# Altium footprint library LimeMicroAltiumLib.PcbLib: 876 footprints (part 13 of 57)
Each footprint in its own frame and in the unit in brackets; x right, y up, seen from the top. Pads: shape width x height; smd on the part's side, far side on the other; paste and mask are expansions set on the pad; w line width, h text height; cw(c..) or ccw(c..) is an arc to the next point about the centre after c.
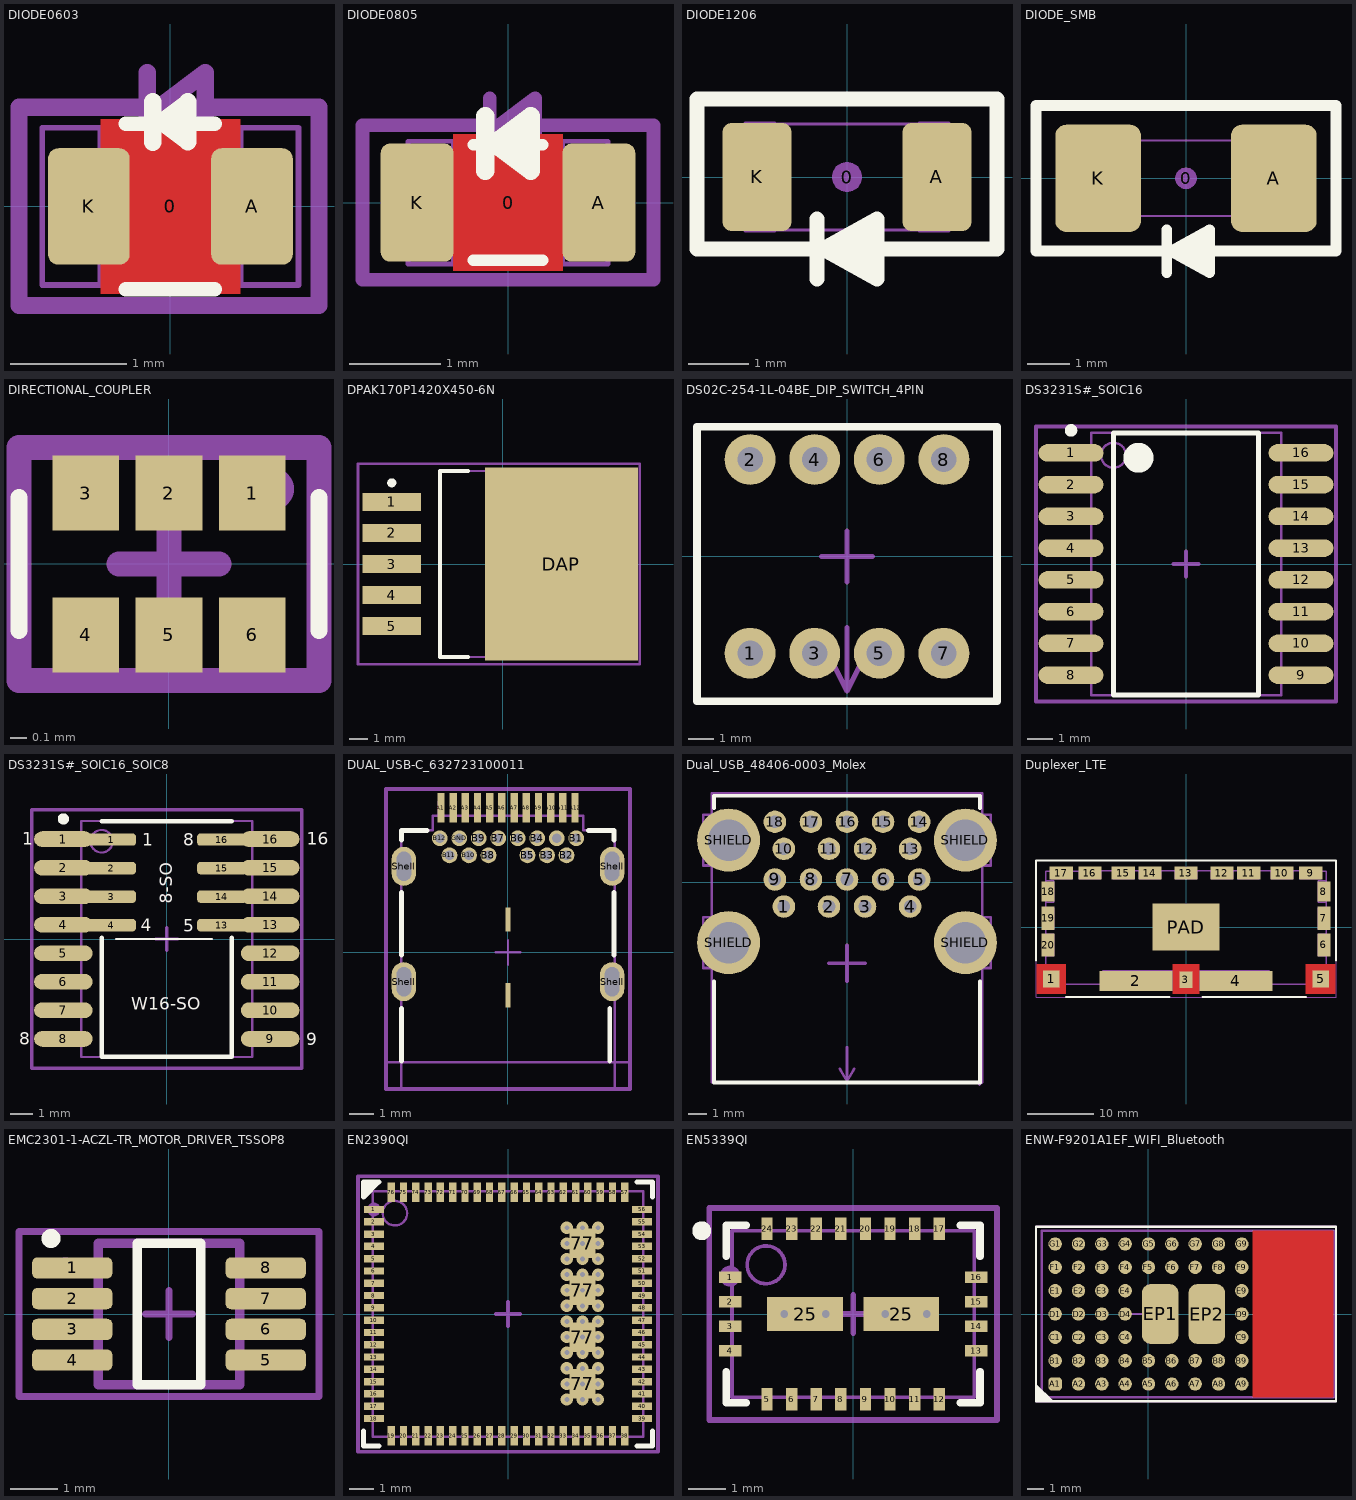
[diagram p12: the footprints below, top view; thin cyan lines are the x and y axes]

## DIODE0603 [mm]
height 0.7
pads (3):
  round 0.254 on Mech15: 0(0,0)
  rrect25% 0.7x1 smd: A(0.7,0) K(-0.7,0)
Top Layer:
  pour cut-out: -0.6,0.75 0.6,0.75 0.6,-0.75 -0.6,-0.75
Top Overlay:
  lines w0.127: -0.381,-0.71 0.381,-0.71 ; -0.381,0.71 0.381,0.71
  lines w0.15: -0.15,0.55 -0.15,0.9 ; 0.15,0.894 -0.075,0.725 0.15,0.556 0.15,0.897
Mechanical 13:
  lines w0.05: 0.6,-0.674 -0.6,-0.674 ; -0.6,-0.674 0.6,-0.674 ; -0.6,-0.675 -1.1,-0.675 -1.1,0.675 -0.6,0.675 -0.6,-0.675 ; 0.6,-0.675 1.1,-0.675 1.1,0.675 0.6,0.675 ; 0.6,-0.675 0.6,0.675 ; 0.6,0.674 -0.6,0.674 0.6,0.674
Mechanical 15:
  lines w0.15: -0.2,0.55 -0.2,1.15 ; -0.1,0.85 0.3,0.55 0.3,1.15 ; -0.1,0.85 0.3,1.15 ; -0.1,0.85 0.3,0.85 0.3,1.15 ; -1.3,-0.85 -1.3,0.85 1.275,0.85 1.275,-0.85 -1.3,-0.85
  text "C" at -1.05,-0.4 h0.55
  text "A" at 0.5,-0.375 h0.55
  text ".Designator" at 0,0 h0.55
3D body "RES 0805 (2012 metric).STEP": height 0.69, standoff -0.01, extent -1.1,-0.675 1.1,0.675

## DIODE0805 [mm] "Chip Resistor, Body 2.0x1.2mm, 0805, IPC Medium Density"
height 0.7
pads (3):
  round 0.254 on Mech15: 0(0,0)
  rrect25% 0.8x1.3 smd: A(1,0) K(-1,0)
Top Layer:
  pour cut-out: -0.6,0.75 0.6,0.75 0.6,-0.75 -0.6,-0.75
Top Overlay:
  lines w0.127: -0.381,-0.635 0.381,-0.635 ; -0.381,0.635 0.381,0.635
  lines w0.2: -0.25,0.35 -0.25,0.95 ; -0.15,0.65 0.25,0.35 0.25,0.95 ; -0.15,0.65 0.25,0.95 ; -0.15,0.65 0.25,0.65 0.25,0.95
Mechanical 13:
  lines w0.05: 0.6,-0.674 -0.6,-0.674 ; -0.6,-0.675 -0.6,0.675 -1.1,0.675 -1.1,-0.675 -0.6,-0.675 ; -0.6,-0.674 0.6,-0.674 ; 0.6,-0.675 0.6,0.675 ; 0.6,-0.675 1.1,-0.675 1.1,0.675 0.6,0.675 ; 0.6,0.674 -0.6,0.674 0.6,0.674
Mechanical 15:
  lines w0.15: -0.2,0.55 -0.2,1.15 ; -0.1,0.85 0.3,0.85 0.3,1.15 ; -0.1,0.85 0.3,1.15 ; -0.1,0.85 0.3,0.55 0.3,1.15 ; -1.6,-0.85 1.6,-0.85 1.6,0.85 -1.6,0.85 -1.6,-0.85
  text ".Designator" at 0,0 h0.55
  text "A" at 0.7,-0.3 h0.55
  text "C" at -1.275,-0.3 h0.55
3D body "RES 0805 (2012 metric).STEP": height 0.69, standoff -0.01, extent -1.1,-0.675 1.1,0.675

## DIODE1206 [mm]
height 1.6
pads (3):
  round 0.508 on Mech15: 0(0,0)
  rrect25% 1.15x1.8 smd: A(1.5,0) K(-1.5,0)
Top Overlay:
  lines w0.254: -0.5,-1.7 -0.5,-0.7 ; 0,-1.4 0.5,-1.4 ; 0.1,-1 0.5,-1 ; 0.5,-1.2 0.3,-1.2 -0.4,-1.2 ; -0.4,-1.2 0.5,-0.7 0.5,-1.7 -0.4,-1.2 ; -2.5,-1.2 2.5,-1.2 2.5,1.3 -2.5,1.3 -2.5,-1.2
Mechanical 13:
  lines w0.05: -1.2,-0.88 1.2,-0.88 ; -1.2,0.88 1.2,0.88 ; -1.7,-0.9 -1.2,-0.9 -1.2,0.9 -1.7,0.9 -1.7,-0.9 ; 1.2,-0.9 1.7,-0.9 1.7,0.9 1.2,0.9 1.2,-0.9
Mechanical 15:
  lines w0.15: -0.5,-1.7 -0.5,-0.7 ; 0,-1.4 0.5,-1.4 ; 0.1,-1 0.5,-1 ; 0.5,-1.2 0.3,-1.2 -0.4,-1.2 ; -0.4,-1.2 0.5,-1.7 0.5,-0.7 -0.4,-1.2 ; -2.5,-1.2 -2.5,1.3 2.5,1.3 2.5,-1.2 -2.5,-1.2
  text ".Designator" at 0,0 h0.55
3D body "CAP_1206.STEP": height 1.74, standoff -0.01, extent -1.7,-0.9 1.7,0.9

## DIODE_SMB [mm]
height 1.6
pads (3):
  round 0.508 on Mech15: 0(0,0)
  rrect25% 2x2.5 smd: A(2.05,0) K(-2.05,0)
Top Overlay:
  lines w0.254: -0.45,-2.2 -0.45,-1.2 ; 0.05,-1.9 0.55,-1.9 ; 0.15,-1.5 0.55,-1.5 ; 0.55,-1.7 0.35,-1.7 -0.35,-1.7 ; -0.35,-1.7 0.55,-1.2 0.55,-2.2 -0.35,-1.7 ; -3.5,-1.7 3.5,-1.7 3.5,1.7 -3.5,1.7 -3.5,-1.7
Mechanical 13:
  lines w0.05: -1.2,-0.88 1.2,-0.88 ; -1.2,0.88 1.2,0.88 ; -1.7,-0.9 -1.2,-0.9 -1.2,0.9 -1.7,0.9 -1.7,-0.9 ; 1.2,-0.9 1.7,-0.9 1.7,0.9 1.2,0.9 1.2,-0.9
Mechanical 15:
  lines w0.15: -0.45,-2.2 -0.45,-1.2 ; 0.05,-1.9 0.55,-1.9 ; 0.15,-1.5 0.55,-1.5 ; 0.55,-1.7 0.35,-1.7 -0.35,-1.7 ; -0.35,-1.7 0.55,-2.2 0.55,-1.2 -0.35,-1.7 ; -3.5,-1.7 -3.5,1.7 3.5,1.7 3.5,-1.7 -3.5,-1.7
  text ".Designator" at 0,0 h0.55
  text "C" at -2.2,-0.5 h0.55
  text "A" at 1.7,-0.5 h0.55
3D body "DO-214AA.STEP": height 2.62, standoff 0, extent -2.7,-2 2.9,1.95

## DIRECTIONAL_COUPLER [mm]
height 0.7
pads (6):
  rect 0.4x0.45 smd mask+0.05: 1(0.5,0.425) 2(0,0.425) 3(-0.5,0.425) 4(-0.5,-0.425) 5(0,-0.425) 6(0.5,-0.425)
Top Overlay:
  lines w0.1: -0.9,-0.4 -0.9,0.4 ; 0.9,-0.4 0.9,0.4
Top Solder:
  region: -0.75,-0.15 0.75,-0.15 0.75,-0.7 -0.75,-0.7
  region: -0.75,0.7 0.75,0.7 0.75,0.15 -0.75,0.15
Mechanical 15:
  circle w0.2: c0.625,0.45 r0.025
  lines w0.15: -0.3,0 0.3,0 ; 0,-0.3 0,0.3 ; -0.9,-0.7 -0.9,0.7 0.9,0.7 0.9,-0.7 -0.9,-0.7
  text ".Designator" at 0,0 h0.55
3D body: height 0.6, standoff 0, extent -0.65,0.275 -0.35,0.425
3D body: height 0.6, standoff 0, extent -0.15,0.275 0.15,0.425
3D body: height 0.6, standoff 0, extent 0.35,0.275 0.65,0.425
3D body: height 0.6, standoff 0, extent 0.35,-0.425 0.65,-0.275
3D body: height 0.6, standoff 0, extent -0.15,-0.425 0.15,-0.275
3D body: height 0.6, standoff 0, extent -0.65,-0.425 -0.35,-0.275
3D body: height 0.6, standoff 0, extent 0.463,-0.075 0.663,0.15
3D body: height 0.6, standoff 0, extent -0.8,-0.4 0.8,0.4

## DPAK170P1420X450-6N [mm] "D2-PAK, 6-Pads, Body 7,75x8,46mm (max), IPC Medium Density"
height 4.5
pads (6):
  rect 3.2x1 smd: 1(-6.1,3.4) 2(-6.1,1.7) 3(-6.1,0) 4(-6.1,-1.7) 5(-6.1,-3.4)
  rect 8.38x10.6 smd: DAP(3.2,0)
Top Overlay:
  circle w0.25: c-6.1,4.45 r0.125
  lines w0.2: -1.9,-5.1 -3.45,-5.1 -3.45,5.1 -1.9,5.1
Mechanical 13:
  lines w0.1: -3.45,-5.1 5.85,-5.1 5.85,5.1 -3.45,5.1 -3.45,-5.1
Mechanical 15:
  circle w0.35: c-6.225,3.425 r0.103
  lines w0.15: -0.5,0 0.5,0 ; 0,-0.5 0,0.5 ; -7.95,-5.5 7.5,-5.5 7.5,5.5 -7.95,5.5 -7.95,-5.5
  text ".Designator" at 0,0 h0.55
3D body: height 4.5, standoff 0, extent -3.45,-5.1 5.85,5.1

## DS02C-254-1L-04BE_DIP_SWITCH_4PIN [mm]
pads (8):
  round 2 hole 1 mask+0.05: 1(-3.81,-3.81) 2(-3.81,3.81) 3(-1.27,-3.81) 4(-1.27,3.81) 5(1.27,-3.81) 6(1.27,3.81) 7(3.81,-3.81) 8(3.81,3.81)
Top Overlay:
  lines w0.3: -5.9,-5.7 -5.9,5.1 5.9,5.1 5.9,-5.7 -5.9,-5.7
Mechanical 15:
  lines w0.2: -1,0 0,0 ; -0.5,-4.3 0,-5.3 ; 0,-2.8 0,-5.3 ; 0,-1 0,0 ; 0,1 0,0 ; 0.5,-4.3 0,-5.3 ; 1,0 0,0 ; -5.9,-5.7 -5.9,5.1 5.9,5.1 5.9,-5.7 -5.9,-5.7
  text "2" at -3.9,3.6 h0.55
  text "1" at -3.9,-4 h0.55
  text "Board edge" at -2.3,-2.4 h0.55
  text ".Designator" at 0,0 h0.55
3D body "CUI_DEVICES_DS02C-254-1L-04BE.step": height 9.46, standoff -3.8, extent -5.865,-7.8 5.865,5.08

## DS3231S#_SOIC16 [mm] "SOIC, 16-Leads, Body 10.3x7.5mm, Pitch 1.27mm, IPC Low Density"
height 2.65
pads (16):
  oval 2.6x0.7 smd: 1(-4.6,4.445) 2(-4.6,3.175) 3(-4.6,1.905) 4(-4.6,0.635) 5(-4.6,-0.635) 6(-4.6,-1.905) 7(-4.6,-3.175) 8(-4.6,-4.445) 9(4.6,-4.445) 10(4.6,-3.175) 11(4.6,-1.905) 12(4.6,-0.635) 13(4.6,0.635) 14(4.6,1.905) 15(4.6,3.175) 16(4.6,4.445)
Top Overlay:
  circle w0.6: c-1.9,4.25 r0.3
  circle w0.25: c-4.6,5.345 r0.125
  lines w0.2: -2.9,-5.25 2.9,-5.25 2.9,5.25 -2.9,5.25 -2.9,-5.25
Mechanical 13:
  circle w0.1: c-2.9,4.35 r0.5
  lines w0.1: -3.8,-5.25 3.8,-5.25 3.8,5.25 -3.8,5.25 -3.8,-5.25
Mechanical 15:
  circle w0.25: c-4.6,4.4 r0.1
  lines w0.15: -0.5,0 0.5,0 ; 0,-0.5 0,0.5 ; -6,-5.5 6,-5.5 6,5.5 -6,5.5 -6,-5.5
  text ".Designator" at 0,0 h0.55
3D body "User Library-SOIC16-300.step": height 2.65, standoff 0, extent -5.15,-5.15 5.15,5.15

## DS3231S#_SOIC16_SOIC8 [mm] "SOIC, 16-Leads, Body 10.3x7.5mm, Pitch 1.27mm, IPC Low Density"
height 2.65
pads (24):
  oval 2.6x0.7 smd: 1(-4.6,4.445) 2(-4.6,3.175) 3(-4.6,1.905) 4(-4.6,0.635) 5(-4.6,-0.635) 6(-4.6,-1.905) 7(-4.6,-3.175) 8(-4.6,-4.445) 9(4.6,-4.445) 10(4.6,-3.175) 11(4.6,-1.905) 12(4.6,-0.635) 13(4.6,0.635) 14(4.6,1.905) 15(4.6,3.175) 16(4.6,4.445)
  rrect50% 2.2x0.55 smd mask+0.05: 1(-2.475,4.425) 2(-2.475,3.155) 3(-2.475,1.885) 4(-2.475,0.615) 13(2.455,0.615) 14(2.455,1.885) 15(2.455,3.155) 16(2.455,4.425)
Top Overlay:
  circle w0.25: c-4.6,5.345 r0.125
  lines w0.1: -2.25,0 2,0
  lines w0.2: -2.9,0.05 -2.9,-5.25 2.9,-5.25 2.9,0.05 ; -2.9,5.25 2.9,5.25
  text "8-SO" at 0.25,1.575 h0.55
  text "W16-SO" at -1.575,-3.15 h0.55
  text "1" at -6.425,4.2 h0.55
  text "1" at -1.1,4.15 h0.55
  text "8" at -6.575,-4.7 h0.55
  text "9" at 6.2,-4.725 h0.55
  text "16" at 6.225,4.2 h0.55
  text "8" at 0.725,4.15 h0.55
  text "4" at -1.15,0.35 h0.55
  text "5" at 0.725,0.325 h0.55
Mechanical 13:
  circle w0.1: c-2.9,4.35 r0.5
  lines w0.1: -3.8,-5.25 3.8,-5.25 3.8,5.25 -3.8,5.25 -3.8,-5.25
Mechanical 15:
  circle w0.25: c-4.6,4.4 r0.1
  lines w0.15: -0.5,0 0.5,0 ; 0,-0.5 0,0.5 ; -6,-5.75 6,-5.75 6,5.75 -6,5.75 -6,-5.75
  text ".Designator" at 0,0 h0.55
3D body "User Library-SOIC16-300.step": height 2.65, standoff 0, extent -5.15,-5.15 5.15,5.15

## DUAL_USB-C_632723100011 [mm]
pads (32):
  rect 0.3x1.2 smd mask+0.05: A1(-2.75,5.93) A2(-2.25,5.93) A3(-1.75,5.93) A4(-1.25,5.93) A5(-0.75,5.93) A6(-0.25,5.93) A7(0.25,5.93) A8(0.75,5.93) A9(1.25,5.93) A10(1.75,5.93) A11(2.25,5.93) A12(2.75,5.93)
  round 0.65 hole 0.4 mask+0.05: B1(2.8,4.68) B2(2.4,3.98) B3(1.6,3.98) B4(1.2,4.68) B5(0.8,3.98) B6(0.4,4.68) B7(-0.4,4.68) B8(-0.8,3.98) B9(-1.2,4.68) B10(-1.6,3.98) B11(-2.4,3.98) B12(-2.8,4.68) GND(-2,4.68) GND1(2,4.68)
  oval 1x1.6 hole 0.6 slot 1.2 at 90 deg mask+0.05: Shell(-4.27,-1.2) Shell(-4.27,3.53) Shell(4.27,-1.2) Shell(4.27,3.53)
  rect 0.2x1 smd mask+0.05: Shell(0,-1.75) Shell(0,1.35)
Top Overlay:
  lines w0.2: -4.37,-4.45 -4.37,-2.3 ; -4.37,-0.1 -4.37,2.45 ; -4.37,4.6 -4.37,5 -3.32,5 ; 3.29,5 4.34,5 4.34,4.6 ; 4.17,-4.45 4.17,-2.3 ; 4.34,-0.1 4.34,2.45
Mechanical 13:
  lines w0.05: -2.85,5.6 -2.85,6.19 -2.65,6.19 -2.65,5.6 ; -2.35,5.6 -2.35,6.19 -2.15,6.19 -2.15,5.6 ; -1.85,5.6 -1.85,6.19 -1.65,6.19 -1.65,5.6 ; -1.35,5.6 -1.35,6.19 -1.15,6.19 -1.15,5.6 ; -0.85,5.6 -0.85,6.19 -0.65,6.19 -0.65,5.6 ; -0.35,5.6 -0.35,6.19 -0.15,6.19 -0.15,5.6 ; 0.15,5.6 0.15,6.19 0.35,6.19 0.35,5.6 ; 0.65,5.6 0.65,6.19 0.85,6.19 0.85,5.6 ; 1.15,5.6 1.15,6.19 1.35,6.19 1.35,5.6 ; 1.65,5.6 1.65,6.19 1.85,6.19 1.85,5.6 ; 2.15,5.6 2.15,6.19 2.35,6.19 2.35,5.6 ; 2.65,5.6 2.65,6.19 2.85,6.19 2.85,5.6
  lines w0.1: 4.34,-5.6 -4.37,-5.6 -4.37,5 -3.08,5 -3.08,5.6 3.08,5.6 3.08,5 4.37,5 4.37,-5.6
Mechanical 15:
  lines w0.1: -5,-4.5 5,-4.5 ; -0.5,0 0.5,0 ; 0,-0.5 0,0.5
  lines w0.15: -5,-5.6 -5,6.7 5,6.7 5,-5.6 -5,-5.6
  text ".Designator" at 0,0 h0.55
  text "PCB edge" at -2.2,-4.1 h0.55
  text "A1" at -3.4,5.6 h0.55
  text "A12" at 2.7,5.6 h0.55
3D body "632723100011.stp": height 3.05, standoff -1.81, extent -4.37,-5.6 4.37,6.194

## Dual_USB_48406-0003_Molex [mm]
pads (22):
  round 1.25 hole 0.7 paste-0.61 mask+0: 1(-3.5,-1.35) 2(-1,-1.35) 3(1,-1.35) 4(3.5,-1.35) 5(4,0.15) 6(2,0.15) 7(0,0.15) 8(-2,0.15) 9(-4,0.15) 10(-3.5,1.85) 11(-1,1.85) 12(1,1.85) 13(3.5,1.85) 14(4,3.35) 15(2,3.35) 16(0,3.35) 17(-2,3.35) 18(-4,3.35)
  round 3.5 hole 2.3 paste-1.156 mask-1.156: SHIELD(-6.57,-3.35) SHIELD(-6.57,2.33) SHIELD(6.57,-3.35) SHIELD(6.57,2.33)
Top Overlay:
  lines w0.2: -7.379,-5.5 -7.379,-11.11 7.379,-11.11 7.379,-5.5 ; -7.379,4.1 -7.379,4.797 7.379,4.797 7.379,4.1
Mechanical 15:
  lines w0.15: -0.4,-10.35 0,-11.05 ; 0,-9.15 0,-11.05 ; 0.4,-10.35 0,-11.05
  lines w0.152: 7.35,-11.225 7.506,-11.069 7.506,-4.76 7.98,-4.76 7.98,-1.94 7.506,-1.94 7.506,0.92 7.98,0.92 7.98,3.74 7.506,3.74 7.506,4.924 -7.506,4.924 -7.506,3.74 -7.98,3.74 -7.98,0.92 -7.506,0.92 -7.506,-1.94 -7.98,-1.94 -7.98,-4.76 -7.506,-4.76 -7.506,-11.1 7.506,-11.1
  lines w0.2: -1,-4.5 0,-4.5 ; 0,-5.5 0,-4.5 ; 0,-3.5 0,-4.5 ; 1,-4.5 0,-4.5
  text "PCB edge" at -1.8,-9.25 h0.55
  text "10" at -3.9,1.6 h0.55
  text "11" at -1.4,1.6 h0.55
  text "12" at 0.6,1.6 h0.55
  text "13" at 3.1,1.6 h0.55
  text "18" at -4.4,3.1 h0.55
  text "17" at -2.4,3.1 h0.55
  text "16" at -0.4,3.1 h0.55
  text "15" at 1.6,3.1 h0.55
  text "14" at 3.6,3.1 h0.55
  text "5" at 3.9,-0.1 h0.55
  text "6" at 1.9,-0.1 h0.55
  text "7" at -0.1,-0.1 h0.55
  text "8" at -2.1,-0.1 h0.55
  text "9" at -4.1,-0.1 h0.55
  text "4" at 3.4,-1.6 h0.55
  text "3" at 0.9,-1.6 h0.55
  text "2" at -1.1,-1.6 h0.55
  text "1" at -3.6,-1.6 h0.55
  text ".Designator" at 0,-4.5 h0.55
3D body "484060003.stp": height 16.2, standoff -3.2, extent -7.835,-12.81 7.835,4.65

## Duplexer_LTE [mm] "Ceramic duplexer for LTE bands"
pads (21):
  rect 2.5x2.5 smd mask+0.05: 1(-20.2,-7.8) 5(20.2,-7.8)
  rect 11x3 smd mask+0.05: 2(-7.5,-8.1) 4(7.5,-8.1)
  rect 2x2.5 smd mask+0.05: 3(0,-7.9)
  rect 2x3.5 smd mask+0.05: 6(20.7,-2.7) 7(20.7,1.3) 19(-20.7,1.3) 20(-20.7,-2.7)
  rect 2x3 smd mask+0.05: 8(20.7,5.3) 18(-20.7,5.3)
  rect 3.5x2 smd mask+0.05: 9(18.7,8.1) 10(14.4,8.1) 11(9.4,8.1) 12(5.4,8.1) 13(0,8.1) 14(-5.4,8.1) 15(-9.4,8.1) 16(-14.4,8.1) 17(-18.7,8.1)
  rect 10x7 smd mask+0.05: PAD(0,0)
Top Layer:
  pour cut-out: -22.4,-10 -22.4,-5.6 -18,-5.6 -18,-10
  pour cut-out: -2,-10 -2,-5.6 2,-5.6 2,-10
  pour cut-out: 18,-10 18,-5.6 22.4,-5.6 22.4,-10
Top Overlay:
  lines w0.3: -22.5,-5 -22.5,10 22.5,10 22.5,-5 ; -18,-10.5 -2.5,-10.5 ; 2.5,-10.5 18,-10.5
Mechanical 13:
  lines w0.2: -21,-6.6 -19,-6.6 -19,-8.6 ; -21,-4.3 -19.8,-4.3 -19.8,-1.1 -21,-1.1 ; -21,-0.3 -19.8,-0.3 -19.8,2.9 -21,2.9 ; -21,3.7 -19.8,3.7 -19.8,6.9 -21,6.9 ; -20.3,8.4 -20.3,7.2 -17.1,7.2 -17.1,8.4 ; -16,8.4 -16,7.2 -12.8,7.2 -12.8,8.4 ; -11,8.4 -11,7.2 -7.8,7.2 -7.8,8.4 ; -7,8.4 -7,7.2 -3.8,7.2 -3.8,8.4 ; -1.6,8.4 -1.6,7.2 1.6,7.2 1.6,8.4 ; 3.8,8.4 3.8,7.2 7,7.2 7,8.4 ; 7.8,8.4 7.8,7.2 11,7.2 11,8.4 ; 12.8,8.4 12.8,7.2 16,7.2 16,8.4 ; 17.1,8.4 17.1,7.2 20.3,7.2 20.3,8.4 ; 19,-8.6 19,-6.6 21,-6.6 ; 21,-4.3 19.8,-4.3 19.8,-1.1 21,-1.1 ; 21,-0.3 19.8,-0.3 19.8,2.9 21,2.9 ; 21,3.7 19.8,3.7 19.8,6.9 21,6.9 ; -15.107,8.4 ccw(c-14.4,8.4) -13.693,8.4 -10.107,8.4 ccw(c-9.4,8.4) -8.693,8.4 -6.107,8.4 ccw(c-5.4,8.4) -4.693,8.4 -0.707,8.4 ccw(c0,8.4) 0.707,8.4 4.693,8.4 ccw(c5.4,8.4) 6.107,8.4 8.693,8.4 ccw(c9.4,8.4) 10.107,8.4 13.693,8.4 ccw(c14.4,8.4) 15.107,8.4 17.993,8.4 ; -15.107,8.4 -15.107,8.4 ; -15.107,8.4 -17.993,8.4 cw(c-18.7,8.4) -19.407,8.4 -21,8.4 -21,6.007 cw(c-21,5.3) -21,4.593 -21,2.007 cw(c-21,1.3) -21,0.593 -21,-1.993 cw(c-21,-2.7) -21,-3.407 -21,-8.6 -12.5,-8.6 ; -12.5,-8.6 -10.207,-8.6 ; -12.5,-8.6 -12.5,-6.6 -2,-6.6 -2,-8.6 ; -10.207,-8.6 cw(c-9.5,-8.6) -8.793,-8.6 -6.207,-8.6 cw(c-5.5,-8.6) -4.793,-8.6 -2,-8.6 ; -10.207,-8.6 -10.207,-8.6 ; -2,-8.6 -2,-8.6 ; 2,-8.6 4.793,-8.6 cw(c5.5,-8.6) 6.207,-8.6 8.793,-8.6 cw(c9.5,-8.6) 10.207,-8.6 ; 2,-8.6 2,-8.6 ; 2,-8.6 2,-6.6 12.5,-6.6 12.5,-8.6 ; 10.207,-8.6 12.5,-8.6 ; 10.207,-8.6 10.207,-8.6 ; 12.5,-8.6 21,-8.6 21,-3.407 cw(c21,-2.7) 21,-1.993 21,0.593 cw(c21,1.3) 21,2.007 21,4.593 cw(c21,5.3) 21,6.007 21,8.4 19.407,8.4 cw(c18.7,8.4) 17.993,8.4 ; 17.993,8.4 17.993,8.4 ; -1,-8.6 -1,-6.6 1,-6.6 1,-8.6 -1,-8.6
Mechanical 15:
  lines w0.15: -1.5,0 1.5,0 ; 0,-1.5 0,1.5 ; -22.5,-10.5 -22.5,10 22.5,10 22.5,-10.5 -22.5,-10.5
  text ".Designator" at 0,0 h0.55
  text "I/O port" at -21.5,-8 h0.55
  text "I/O port" at 17.5,-8 h0.55
  text "ANTENNA" at -2,-8 h0.55
3D body: height 9.5, standoff 0, extent -21,-8.6 21,8.4

## EMC2301-1-ACZL-TR_MOTOR_DRIVER_TSSOP8 [mm]
pads (8):
  rrect50% 1.7x0.45 smd paste+0 mask+0.05: 1(-2.05,0.975) 2(-2.05,0.325) 3(-2.05,-0.325) 4(-2.05,-0.975) 5(2.05,-0.975) 6(2.05,-0.325) 7(2.05,0.325) 8(2.05,0.975)
Top Overlay:
  circle w0.25: c-2.5,1.6 r0.077
  lines w0.2: -0.673,-1.5 -0.673,1.5 0.673,1.5 0.673,-1.5 -0.673,-1.5
Mechanical 13:
  lines w0.2: -1.5,-1.5 -1.5,1.5 1.5,1.5 1.5,-1.5 -1.5,-1.5
Mechanical 15:
  circle w0.2: c-2.2,1 r0.1
  lines w0.15: -0.5,0 0,0 ; 0,-0.5 0,0 ; 0,0.5 0,0 ; 0.5,0 0,0 ; -3.177,-1.75 -3.177,1.75 3.177,1.75 3.177,-1.75 -3.177,-1.75
  text ".Designator" at 0,0 h0.55
3D body "IC_Microchip_EMC2301-1-ACZL-TR_eec.STEP": height 0.25, standoff 0, extent -3.177,-1.75 3.177,1.75

## EN2390QI [mm] "QFN, 76-Leads, Body 10,00x11,00mm, Pitch 0,50mm, Thermal Pad 1,20x1,05mm, IPC Medium Density"
height 3
pads (80):
  rect 0.8x0.3 smd: 1(-5.45,4.25) 2(-5.45,3.75) 3(-5.45,3.25) 4(-5.45,2.75) 5(-5.45,2.25) 6(-5.45,1.75) 7(-5.45,1.25) 8(-5.45,0.75) 9(-5.45,0.25) 10(-5.45,-0.25) 11(-5.45,-0.75) 12(-5.45,-1.25) 13(-5.45,-1.75) 14(-5.45,-2.25) 15(-5.45,-2.75) 16(-5.45,-3.25) 17(-5.45,-3.75) 18(-5.45,-4.25) 39(5.45,-4.25) 40(5.45,-3.75) 41(5.45,-3.25) 42(5.45,-2.75) 43(5.45,-2.25) 44(5.45,-1.75) 45(5.45,-1.25) 46(5.45,-0.75) 47(5.45,-0.25) 48(5.45,0.25) 49(5.45,0.75) 50(5.45,1.25) 51(5.45,1.75) 52(5.45,2.25) 53(5.45,2.75) 54(5.45,3.25) 55(5.45,3.75) 56(5.45,4.25)
  rect 0.3x0.8 smd: 19(-4.75,-4.95) 20(-4.25,-4.95) 21(-3.75,-4.95) 22(-3.25,-4.95) 23(-2.75,-4.95) 24(-2.25,-4.95) 25(-1.75,-4.95) 26(-1.25,-4.95) 27(-0.75,-4.95) 28(-0.25,-4.95) 29(0.25,-4.95) 30(0.75,-4.95) 31(1.25,-4.95) 32(1.75,-4.95) 33(2.25,-4.95) 34(2.75,-4.95) 35(3.25,-4.95) 36(3.75,-4.95) 37(4.25,-4.95) 38(4.75,-4.95) 57(4.75,4.95) 58(4.25,4.95) 59(3.75,4.95) 60(3.25,4.95) 61(2.75,4.95) 62(2.25,4.95) 63(1.75,4.95) 64(1.25,4.95) 65(0.75,4.95) 66(0.25,4.95) 67(-0.25,4.95) 68(-0.75,4.95) 69(-1.25,4.95) 70(-1.75,4.95) 71(-2.25,4.95) 72(-2.75,4.95) 73(-3.25,4.95) 74(-3.75,4.95) 75(-4.25,4.95) 76(-4.75,4.95)
  rect 1.05x1.2 smd: 77(3.029,-2.844) 77(3.029,-0.939) 77(3.029,0.966) 77(3.029,2.871)
via 3.029,-2.844 diameter 0.5 hole 0.2
via 2.394,-2.844 diameter 0.5 hole 0.2
via 2.394,-3.479 diameter 0.5 hole 0.2
via 3.029,-3.479 diameter 0.5 hole 0.2
via 3.664,-3.479 diameter 0.5 hole 0.2
via 3.664,-2.844 diameter 0.5 hole 0.2
via 3.664,-2.209 diameter 0.5 hole 0.2
via 3.029,-2.209 diameter 0.5 hole 0.2
via 2.394,-2.209 diameter 0.5 hole 0.2
via 3.029,-0.939 diameter 0.5 hole 0.2
via 2.394,-0.939 diameter 0.5 hole 0.2
via 2.394,-1.574 diameter 0.5 hole 0.2
via 3.029,-1.574 diameter 0.5 hole 0.2
via 3.664,-1.574 diameter 0.5 hole 0.2
via 3.664,-0.939 diameter 0.5 hole 0.2
via 3.664,-0.304 diameter 0.5 hole 0.2
via 3.029,-0.304 diameter 0.5 hole 0.2
via 2.394,-0.304 diameter 0.5 hole 0.2
via 3.029,0.966 diameter 0.5 hole 0.2
via 2.394,0.966 diameter 0.5 hole 0.2
via 2.394,0.331 diameter 0.5 hole 0.2
via 3.029,0.331 diameter 0.5 hole 0.2
via 3.664,0.331 diameter 0.5 hole 0.2
via 3.664,0.966 diameter 0.5 hole 0.2
via 3.664,1.601 diameter 0.5 hole 0.2
via 3.029,1.601 diameter 0.5 hole 0.2
via 2.394,1.601 diameter 0.5 hole 0.2
via 2.394,3.506 diameter 0.5 hole 0.2
via 3.029,3.506 diameter 0.5 hole 0.2
via 3.664,3.506 diameter 0.5 hole 0.2
via 3.664,2.871 diameter 0.5 hole 0.2
via 3.664,2.236 diameter 0.5 hole 0.2
via 3.029,2.236 diameter 0.5 hole 0.2
via 2.394,2.236 diameter 0.5 hole 0.2
via 2.394,2.871 diameter 0.5 hole 0.2
via 3.029,2.871 diameter 0.5 hole 0.2
Top Overlay:
  region: -5.875,4.75 -5.875,5.375 -5.25,5.375
  lines w0.2: -5.875,-4.75 -5.875,-5.375 -5.25,-5.375 ; 5.25,-5.375 5.875,-5.375 5.875,-4.75 ; 5.25,5.375 5.875,5.375 5.875,4.75 ; -5.875,4.75 -5.25,5.375 -5.875,5.375 -5.875,4.75
Top Solder:
  region: 2.394,-3.479
Mechanical 13:
  circle w0.1: c-4.6,4.1 r0.5
  lines w0.1: -5.5,-5 -5.5,5 5.5,5 5.5,-5 -5.5,-5
Mechanical 15:
  circle w0.35: c-5.45,4.25 r0.1
  lines w0.15: -0.5,0 0.5,0 ; 0,-0.5 0,0.5 ; -6.1,-5.6 -6.1,5.6 6.1,5.6 6.1,-5.6 -6.1,-5.6
  text ".Designator" at 0,0 h0.55
3D body: height 3, standoff 0.01, extent -5.5,-5 5.5,5

## EN5339QI [mm] "QFN, 24-Leads, Body 4,40x6,40mm, Pitch 0,65mm, Thermal Pad 0,90x2,00mm, IPC Medium Density"
height 1.1
pads (26):
  rect 0.6x0.3 smd: 1(-3.25,0.975) 2(-3.25,0.325) 3(-3.25,-0.325) 4(-3.25,-0.975) 13(3.25,-0.975) 14(3.25,-0.325) 15(3.25,0.325) 16(3.25,0.975)
  rect 0.3x0.6 smd: 5(-2.275,-2.25) 6(-1.625,-2.25) 7(-0.975,-2.25) 8(-0.325,-2.25) 9(0.325,-2.25) 10(0.975,-2.25) 11(1.625,-2.25) 12(2.275,-2.25) 17(2.275,2.25) 18(1.625,2.25) 19(0.975,2.25) 20(0.325,2.25) 21(-0.325,2.25) 22(-0.975,2.25) 23(-1.625,2.25) 24(-2.275,2.25)
  rect 2x0.9 smd: 25(-1.27,0) 25(1.27,0)
via -0.72,0 diameter 0.5 hole 0.2
via -1.82,0 diameter 0.5 hole 0.2
via 1.947,0 diameter 0.5 hole 0.2
via 0.847,0 diameter 0.5 hole 0.2
Top Overlay:
  circle w0.25: c-4,2.2 r0.125
  lines w0.2: -3.35,-1.525 -3.35,-2.35 -2.825,-2.35 ; -3.35,1.525 -3.35,2.35 -2.825,2.35 ; 2.825,-2.35 3.35,-2.35 3.35,-1.525 ; 2.825,2.35 3.35,2.35 3.35,1.525
Mechanical 13:
  circle w0.1: c-2.3,1.3 r0.5
  lines w0.1: -3.2,-2.2 -3.2,2.2 3.2,2.2 3.2,-2.2 -3.2,-2.2
Mechanical 15:
  circle w0.35: c-3.25,1 r0.1
  lines w0.15: -0.5,0 0.5,0 ; 0,-0.5 0,0.5 ; -3.8,-2.8 -3.8,2.8 3.8,2.8 3.8,-2.8 -3.8,-2.8
  text ".Designator" at 0,0 h0.55
3D body: height 1.1, standoff 0.01, extent -3.2,-2.2 3.2,2.2

## ENW-F9201A1EF_WIFI_Bluetooth [mm]
pads (53):
  rrect50% 0.8x0.8 smd mask+0.05: A1(-5.6,-4.2)
  round 0.8 smd mask+0.05: A2(-4.2,-4.2) A3(-2.8,-4.2) A4(-1.4,-4.2) A5(0,-4.2) A6(1.4,-4.2) A7(2.8,-4.2) A8(4.2,-4.2) A9(5.6,-4.2) B1(-5.6,-2.8) B2(-4.2,-2.8) B3(-2.8,-2.8) B4(-1.4,-2.8) B5(0,-2.8) B6(1.4,-2.8) B7(2.8,-2.8) B8(4.2,-2.8) B9(5.6,-2.8) C1(-5.6,-1.4) C2(-4.2,-1.4) C3(-2.8,-1.4) C4(-1.4,-1.4) C9(5.6,-1.4) D1(-5.6,0) D2(-4.2,0) D3(-2.8,0) D4(-1.4,0) D9(5.6,0) E1(-5.6,1.4) E2(-4.2,1.4) E3(-2.8,1.4) E4(-1.4,1.4) E9(5.6,1.4) F1(-5.6,2.8) F2(-4.2,2.8) F3(-2.8,2.8) F4(-1.4,2.8) F5(0,2.8) F6(1.4,2.8) F7(2.8,2.8) F8(4.2,2.8) F9(5.6,2.8) G1(-5.6,4.2) G2(-4.2,4.2) G3(-2.8,4.2) G4(-1.4,4.2) G5(0,4.2) G6(1.4,4.2) G7(2.8,4.2) G8(4.2,4.2) G9(5.6,4.2)
  rrect50% 2.2x3.6 smd mask+0.05: EP1(0.7,0) EP2(3.5,0)
Top Layer:
  pour cut-out: 6.25,-5 6.25,5 11.1,5 11.1,-5
Top Overlay:
  region: -6.75,-5.25 -6.75,-4.2 -5.7,-5.25
  lines w0.15: -6.75,-5.25 -6.75,5.25 11.25,5.25 11.25,-5.25 -6.75,-5.25
Mechanical 13:
  lines w0.15: -6.4,-5 -6.4,5 11.1,5 11.1,-5 -6.4,-5
Mechanical 15:
  lines w0.15: -1.425,0 0,0 ; 0,-1.425 0,0 ; 0,1.425 0,0 ; 1.425,0 0,0 ; -6.75,-5.25 -6.75,5.25 11.25,5.25 11.25,-5.25 -6.75,-5.25
  text "A1" at -6.05,-4.625 h0.55
  text "G1" at -6.05,3.725 h0.55
  text "G9" at 5,3.725 h0.55
  text "A9" at 5,-4.625 h0.55
  text ".Designator" at 0,0 h0.55
  text "Antenna area" at 6.8,-0.475 h0.55
3D body: height 1, standoff 0, extent -6.4,-5 11.1,5
3D body: height 2.55, standoff 1, extent -6.25,-4.75 6,4.75
3D body: height 1.55, standoff 1, extent 9.75,-4.75 10.75,-2.75